# EAGLE library part IC_FPGA_ICE40HX4K (library dp_devices.v6)
iCE40HX4K iCE40™ HX ultra-low power, non-volatile FPGA
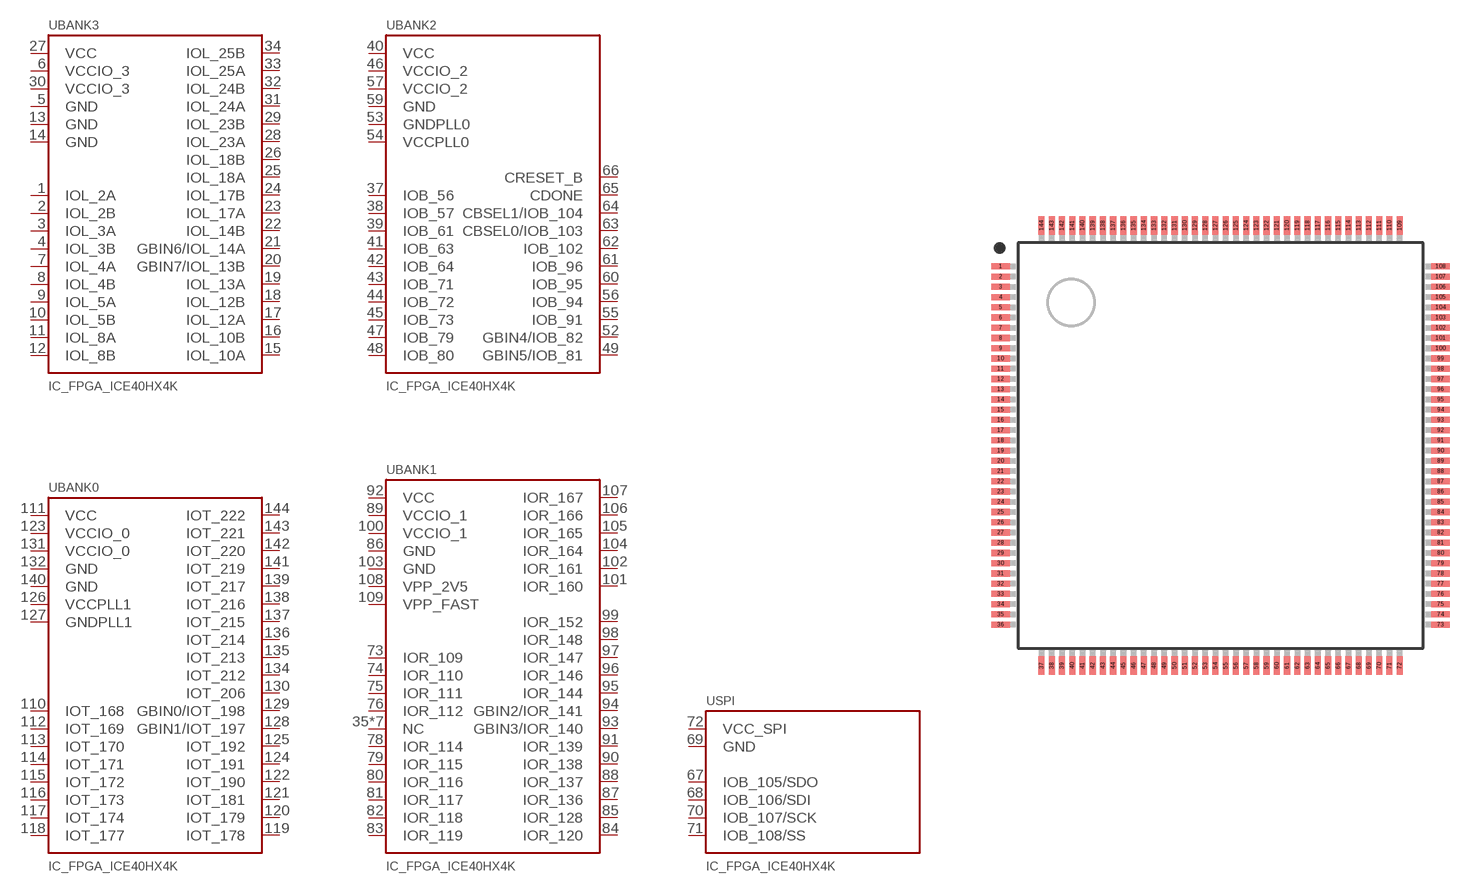
[diagram p200: symbol with the pads of TQFP-144; footprint TQFP-144]

Designator prefix U; gates BANK3=ICE40HX4K_B3 BANK0=ICE40HX4K_B0 BANK1=ICE40HX4K_B1 BANK2=ICE40HX4K_B2 SPI=ICE40HX4K_SPI

## IC_FPGA_ICE40HX4K  [TQFP-144]
1  BANK3:IOL_2A
2  BANK3:IOL_2B
3  BANK3:IOL_3A
4  BANK3:IOL_3B
5  BANK3:GND  pwr
6  BANK3:VCCIO_3  pwr
7  BANK3:IOL_4A
8  BANK3:IOL_4B
9  BANK3:IOL_5A
10  BANK3:IOL_5B
11  BANK3:IOL_8A
12  BANK3:IOL_8B
13  BANK3:GND  pwr
14  BANK3:GND  pwr
15  BANK3:IOL_10A
16  BANK3:IOL_10B
17  BANK3:IOL_12A
18  BANK3:IOL_12B
19  BANK3:IOL_13A
20  BANK3:GBIN7/IOL_13B
21  BANK3:GBIN6/IOL_14A
22  BANK3:IOL_14B
23  BANK3:IOL_17A
24  BANK3:IOL_17B
25  BANK3:IOL_18A
26  BANK3:IOL_18B
27  BANK3:VCC  pwr
28  BANK3:IOL_23A
29  BANK3:IOL_23B
30  BANK3:VCCIO_3  pwr
31  BANK3:IOL_24A
32  BANK3:IOL_24B
33  BANK3:IOL_25A
34  BANK3:IOL_25B
35  BANK1:NC  nc
36  BANK1:NC  nc
37  BANK2:IOB_56
38  BANK2:IOB_57
39  BANK2:IOB_61
40  BANK2:VCC  pwr
41  BANK2:IOB_63
42  BANK2:IOB_64
43  BANK2:IOB_71
44  BANK2:IOB_72
45  BANK2:IOB_73
46  BANK2:VCCIO_2  pwr
47  BANK2:IOB_79
48  BANK2:IOB_80
49  BANK2:GBIN5/IOB_81
50  BANK1:NC  nc
51  BANK1:NC  nc
52  BANK2:GBIN4/IOB_82
53  BANK2:GNDPLL0  pwr
54  BANK2:VCCPLL0  pwr
55  BANK2:IOB_91
56  BANK2:IOB_94
57  BANK2:VCCIO_2  pwr
58  BANK1:NC  nc
59  BANK2:GND  pwr
60  BANK2:IOB_95
61  BANK2:IOB_96
62  BANK2:IOB_102
63  BANK2:CBSEL0/IOB_103
64  BANK2:CBSEL1/IOB_104
65  BANK2:CDONE
66  BANK2:CRESET_B
67  SPI:IOB_105/SDO
68  SPI:IOB_106/SDI
69  SPI:GND  pwr
70  SPI:IOB_107/SCK
71  SPI:IOB_108/SS
72  SPI:VCC_SPI  pwr
73  BANK1:IOR_109
74  BANK1:IOR_110
75  BANK1:IOR_111
76  BANK1:IOR_112
77  BANK1:NC  nc
78  BANK1:IOR_114
79  BANK1:IOR_115
80  BANK1:IOR_116
81  BANK1:IOR_117
82  BANK1:IOR_118
83  BANK1:IOR_119
84  BANK1:IOR_120
85  BANK1:IOR_128
86  BANK1:GND  pwr
87  BANK1:IOR_136
88  BANK1:IOR_137
89  BANK1:VCCIO_1  pwr
90  BANK1:IOR_138
91  BANK1:IOR_139
92  BANK1:VCC  pwr
93  BANK1:GBIN3/IOR_140
94  BANK1:GBIN2/IOR_141
95  BANK1:IOR_144
96  BANK1:IOR_146
97  BANK1:IOR_147
98  BANK1:IOR_148
99  BANK1:IOR_152
100  BANK1:VCCIO_1  pwr
101  BANK1:IOR_160
102  BANK1:IOR_161
103  BANK1:GND  pwr
104  BANK1:IOR_164
105  BANK1:IOR_165
106  BANK1:IOR_166
107  BANK1:IOR_167
108  BANK1:VPP_2V5  pwr
109  BANK1:VPP_FAST  pwr
110  BANK0:IOT_168
111  BANK0:VCC  pwr
112  BANK0:IOT_169
113  BANK0:IOT_170
114  BANK0:IOT_171
115  BANK0:IOT_172
116  BANK0:IOT_173
117  BANK0:IOT_174
118  BANK0:IOT_177
119  BANK0:IOT_178
120  BANK0:IOT_179
121  BANK0:IOT_181
122  BANK0:IOT_190
123  BANK0:VCCIO_0  pwr
124  BANK0:IOT_191
125  BANK0:IOT_192
126  BANK0:VCCPLL1  pwr
127  BANK0:GNDPLL1  pwr
128  BANK0:GBIN1/IOT_197
129  BANK0:GBIN0/IOT_198
130  BANK0:IOT_206
131  BANK0:VCCIO_0  pwr
132  BANK0:GND  pwr
133  BANK1:NC  nc
134  BANK0:IOT_212
135  BANK0:IOT_213
136  BANK0:IOT_214
137  BANK0:IOT_215
138  BANK0:IOT_216
139  BANK0:IOT_217
140  BANK0:GND  pwr
141  BANK0:IOT_219
142  BANK0:IOT_220
143  BANK0:IOT_221
144  BANK0:IOT_222

## Footprint TQFP-144 (pad centres in mm)
smd 0.9 x 0.3: 1 -10.75,8.75; 2 -10.75,8.25; 3 -10.75,7.75; 4 -10.75,7.25; 5 -10.75,6.75; 6 -10.75,6.25; 7 -10.75,5.75; 8 -10.75,5.25; 9 -10.75,4.75; 10 -10.75,4.25; 11 -10.75,3.75; 12 -10.75,3.25; 13 -10.75,2.75; 14 -10.75,2.25; 15 -10.75,1.75; 16 -10.75,1.25; 17 -10.75,0.75; 18 -10.75,0.25; 19 -10.75,-0.25; 20 -10.75,-0.75; 21 -10.75,-1.25; 22 -10.75,-1.75; 23 -10.75,-2.25; 24 -10.75,-2.75; 25 -10.75,-3.25; 26 -10.75,-3.75; 27 -10.75,-4.25; 28 -10.75,-4.75; 29 -10.75,-5.25; 30 -10.75,-5.75; 31 -10.75,-6.25; 32 -10.75,-6.75; 33 -10.75,-7.25; 34 -10.75,-7.75; 35 -10.75,-8.25; 36 -10.75,-8.75; 73 10.75,-8.75; 74 10.75,-8.25; 75 10.75,-7.75; 76 10.75,-7.25; 77 10.75,-6.75; 78 10.75,-6.25; 79 10.75,-5.75; 80 10.75,-5.25; 81 10.75,-4.75; 82 10.75,-4.25; 83 10.75,-3.75; 84 10.75,-3.25; 85 10.75,-2.75; 86 10.75,-2.25; 87 10.75,-1.75; 88 10.75,-1.25; 89 10.75,-0.75; 90 10.75,-0.25; 91 10.75,0.25; 92 10.75,0.75; 93 10.75,1.25; 94 10.75,1.75; 95 10.75,2.25; 96 10.75,2.75; 97 10.75,3.25; 98 10.75,3.75; 99 10.75,4.25; 100 10.75,4.75; 101 10.75,5.25; 102 10.75,5.75; 103 10.75,6.25; 104 10.75,6.75; 105 10.75,7.25; 106 10.75,7.75; 107 10.75,8.25; 108 10.75,8.75
smd 0.3 x 0.9: 37 -8.75,-10.75; 38 -8.25,-10.75; 39 -7.75,-10.75; 40 -7.25,-10.75; 41 -6.75,-10.75; 42 -6.25,-10.75; 43 -5.75,-10.75; 44 -5.25,-10.75; 45 -4.75,-10.75; 46 -4.25,-10.75; 47 -3.75,-10.75; 48 -3.25,-10.75; 49 -2.75,-10.75; 50 -2.25,-10.75; 51 -1.75,-10.75; 52 -1.25,-10.75; 53 -0.75,-10.75; 54 -0.25,-10.75; 55 0.25,-10.75; 56 0.75,-10.75; 57 1.25,-10.75; 58 1.75,-10.75; 59 2.25,-10.75; 60 2.75,-10.75; 61 3.25,-10.75; 62 3.75,-10.75; 63 4.25,-10.75; 64 4.75,-10.75; 65 5.25,-10.75; 66 5.75,-10.75; 67 6.25,-10.75; 68 6.75,-10.75; 69 7.25,-10.75; 70 7.75,-10.75; 71 8.25,-10.75; 72 8.75,-10.75; 109 8.75,10.75; 110 8.25,10.75; 111 7.75,10.75; 112 7.25,10.75; 113 6.75,10.75; 114 6.25,10.75; 115 5.75,10.75; 116 5.25,10.75; 117 4.75,10.75; 118 4.25,10.75; 119 3.75,10.75; 120 3.25,10.75; 121 2.75,10.75; 122 2.25,10.75; 123 1.75,10.75; 124 1.25,10.75; 125 0.75,10.75; 126 0.25,10.75; 127 -0.25,10.75; 128 -0.75,10.75; 129 -1.25,10.75; 130 -1.75,10.75; 131 -2.25,10.75; 132 -2.75,10.75; 133 -3.25,10.75; 134 -3.75,10.75; 135 -4.25,10.75; 136 -4.75,10.75; 137 -5.25,10.75; 138 -5.75,10.75; 139 -6.25,10.75; 140 -6.75,10.75; 141 -7.25,10.75; 142 -7.75,10.75; 143 -8.25,10.75; 144 -8.75,10.75